# Altium schematic symbol library Inductors.SchLib: 9 symbols
Pins are listed as number, name and electrical type; pins without a type are passive.

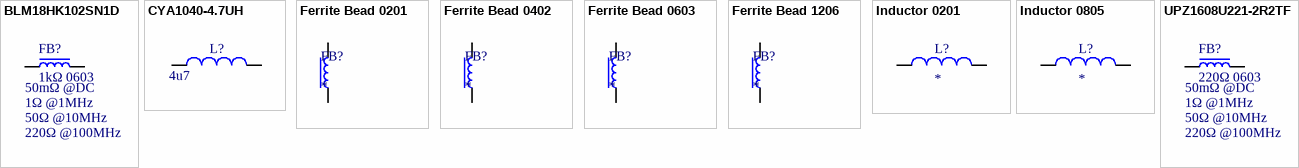
[diagram p0: symbols BLM18HK102SN1D to UPZ1608U221-2R2TF]

## BLM18HK102SN1D
designator FB?, comment 1kΩ 0603  DC Resistance: 50mΩ @DC  1MHz Impedance: 220Ω @100MHz  10MHz Impedance: 50Ω @10MHz  100MHz Impedance: 1Ω @1MHz
footprint Ferrite_Bead_0603
pins: 1, 2

## CYA1040-4.7UH
designator L?, comment value 4u7  (hidden comment: 9A 4.7uH 14mΩ Inductor)
9A 4.7uH ±20% 12A 14mΩ SMD,11.6x10.1mm Inductors (SMD) ROHS; Manufacturer Part: CYA1040-4.7UH; LCSC Part Number: C6364675
footprint CYA1040
pins: 1, 2

## Ferrite Bead 0201
designator FB?
footprint Ferrite_Bead_0201
pins: 1, 2

## Ferrite Bead 0402
designator FB?
footprint Ferrite_Bead_0402
pins: 1, 2

## Ferrite Bead 0603
designator FB?
footprint Ferrite_Bead_0603
pins: 1, 2

## Ferrite Bead 1206
designator FB?
footprint IND_25_1206_FRT-L
pins: 1, 2

## Inductor 0201
designator L?
MP: LQM21PN3R3MGRD; Package: None; Price: None; Value: *; Availability: Unavailable
footprint Inductor_0201
pins: 1, 2

## Inductor 0805
designator L?
MP: LQM21PN3R3MGRD; Package: None; Price: None; Value: *; Availability: Unavailable
footprint Inductor 0805
pins: 1, 2

## UPZ1608U221-2R2TF
designator FB?, comment 220Ω 0603  DC Resistance: 50mΩ @DC  1MHz Impedance: 220Ω @100MHz  10MHz Impedance: 50Ω @10MHz  100MHz Impedance: 1Ω @1MHz
footprint Ferrite_Bead_0603
pins: 1, 2